# EAGLE library part IC_AD8495 (library dp_devices.v6)
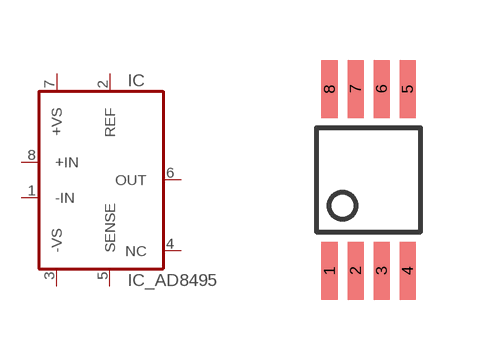
[diagram p161: symbol with the pads of MSOP8; footprint MSOP8]

Designator prefix IC

## IC_AD8495  [MSOP8]
1  -IN  in
2  REF
3  -VS  pwr
4  NC
5  SENSE
6  OUT  out
7  +VS  pwr
8  +IN  in

## Footprint MSOP8 (pad centres in mm)
smd 0.4 x 1.45: 1 -0.975,-2.275; 2 -0.325,-2.275; 3 0.325,-2.275; 4 0.975,-2.275; 5 0.975,2.275; 6 0.325,2.275; 7 -0.325,2.275; 8 -0.975,2.275